# Altium footprint library Single_ETU_b_rev1.PcbLib: 25 footprints (part 2 of 4)
Each footprint in its own frame and in the unit in brackets; x right, y up, seen from the top. Pads: shape width x height; smd on the part's side, far side on the other; paste and mask are expansions set on the pad; w line width, h text height; cw(c..) or ccw(c..) is an arc to the next point about the centre after c.
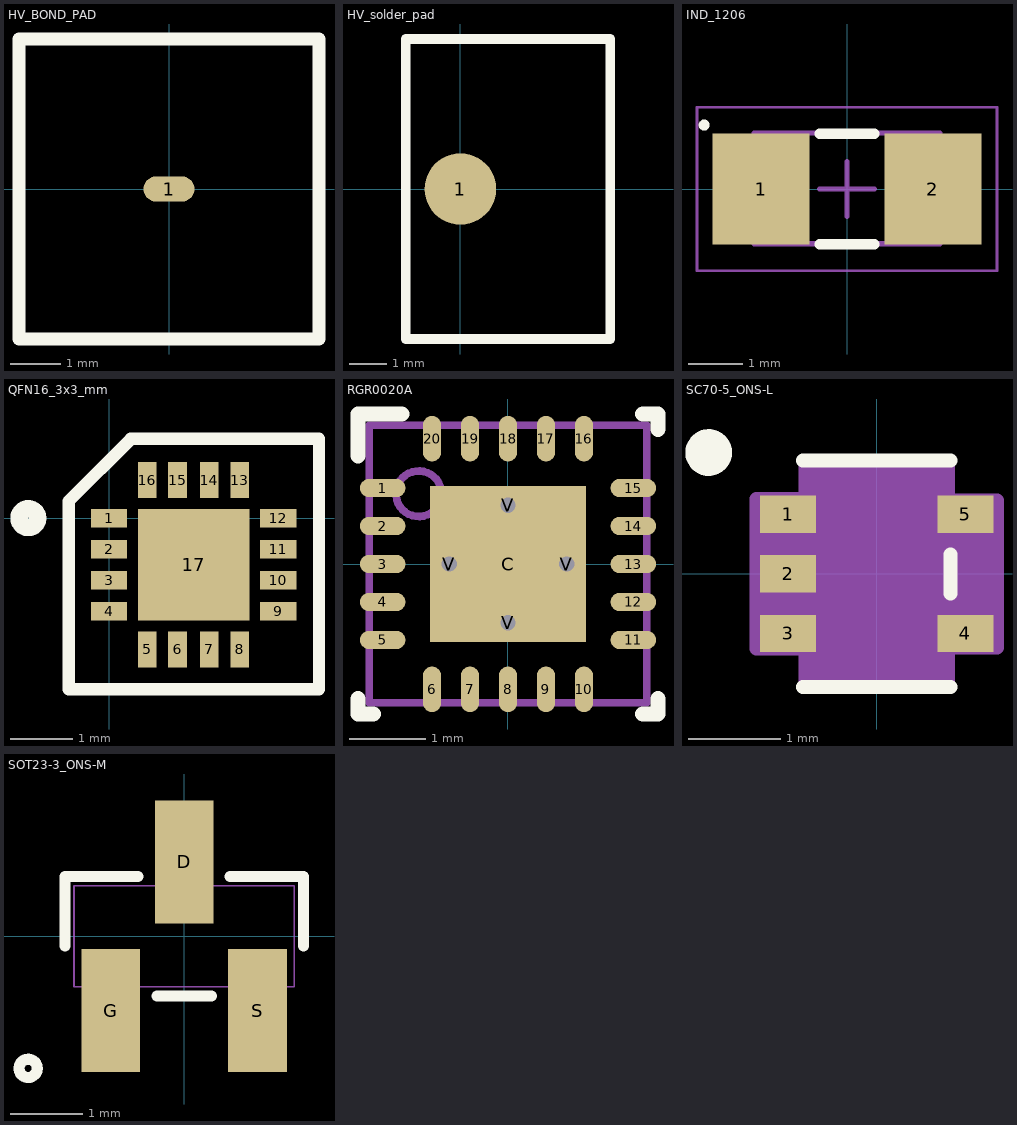
[diagram p1: the footprints below, top view; thin cyan lines are the x and y axes]

## HV_BOND_PAD [mil] "Bonding site for high voltage bias to Timepix"
height 1
pads (1):
  oval 40x20 smd paste-30 mask+10: 1(0,0)
Top Overlay:
  lines w10: -118.11,-118.11 118.11,-118.11 118.11,118.11 -118.11,118.11 -118.11,-118.11

## HV_solder_pad [mil] "wire soldering site for high voltage bias to Timepix"
height 1
pads (1):
  round 75 smd: 1(0,0)
Top Overlay:
  lines w10: -57.52,-157.48 157.48,-157.48 157.48,157.48 -57.52,157.48 -57.52,-157.48

## IND_1206 [mil] "Chip Inductor, 2-Leads, Body 3.20x1.60mm, IPC Low Density"
height 109.84
pads (2):
  rect 70x80 smd: 1(-62,0) 2(62,0)
Top Overlay:
  circle w3.94: c-103.13,46.15 r1.97
  lines w7.87: -19.68,-39.86 19.69,-39.86 ; -19.68,39.86 19.69,39.86
Mechanical 13:
  lines w3.94: -66.93,-39.43 66.93,-39.43 ; -66.93,-35.43 -66.93,35.43 ; -66.93,40.43 66.93,40.43 ; 66.93,-35.43 66.93,35.43
Mechanical 15:
  lines w1.97: -108.27,-59.06 -108.27,59.06 108.27,59.06 108.27,-59.06 -108.27,-59.06
  lines w3.94: -19.68,0 19.69,0 ; 0,-19.69 0,19.69
3D body: height 109.84, standoff 0, extent -46.85,-35.43 46.85,35.43
3D body: height 109.84, standoff 0, extent -66.93,-35.43 -46.85,35.43
3D body: height 109.84, standoff 0, extent 46.85,-35.43 66.93,35.43

## QFN16_3x3_mm [mm]
height 0.254
pads (17):
  rect 0.58x0.3 smd: 1(0,0) 2(0,-0.5) 3(0,-1) 4(0,-1.5) 9(2.72,-1.5) 10(2.72,-1) 11(2.72,-0.5) 12(2.72,0)
  rect 0.3x0.58 smd: 5(0.61,-2.11) 6(1.1,-2.11) 7(1.61,-2.11) 8(2.1,-2.11) 13(2.1,0.61) 14(1.61,0.61) 15(1.1,0.61) 16(0.61,0.61)
  rect 1.789x1.789 smd paste-0.076: 17(1.36,-0.75)
Top Overlay:
  circle w0.28: c-1.3,0 r0.15
  lines w0.2: -0.65,-2.75 -0.65,0.275 0.35,1.275 3.375,1.275 3.375,-2.75 -0.65,-2.75

## RGR0020A [mm]
height 2.79
pads (25):
  oval 0.6x0.24 smd paste+0 mask+0.051: 1(-1.65,1) 2(-1.65,0.5) 3(-1.65,0) 4(-1.65,-0.5) 5(-1.65,-1) 11(1.65,-1) 12(1.65,-0.5) 13(1.65,0) 14(1.65,0.5) 15(1.65,1)
  oval 0.24x0.6 smd paste+0 mask+0: 6(-1,-1.65)
  oval 0.24x0.6 smd paste+0 mask+0.051: 7(-0.5,-1.65) 8(0,-1.65) 9(0.5,-1.65) 10(1,-1.65) 16(1,1.65) 17(0.5,1.65) 18(0,1.65) 19(-0.5,1.65) 20(-1,1.65)
  rect 2.05x2.05 smd paste-0.051 mask+0.051: C(0,0)
  round 0.5 hole 0.203 mask+0.051: V(-0.775,0) V(0,-0.775) V(0,0.775) V(0.775,0)
Top Overlay:
  lines w0.2: -1.975,-1.775 -1.975,-1.975 -1.775,-1.975 ; -1.975,1.425 -1.975,1.975 -1.4,1.975 ; 1.775,-1.975 1.975,-1.975 1.975,-1.775 ; 1.775,1.975 1.975,1.975 1.975,1.775
Top Paste:
  region: 0.1,1.017 0.1,0.1 1.017,0.1 1.017,1.017
  region: -0.1,0.1 -0.1,1.017 -1.017,1.017 -1.017,0.1
  region: -0.1,-1.017 -0.1,-0.1 -1.017,-0.1 -1.017,-1.017
  region: 0.1,-0.1 0.1,-1.017 1.017,-1.017 1.017,-0.1
Mechanical 13:
  circle w0.1: c-1.175,0.925 r0.3
  lines w0.1: -1.825,-1.825 -1.825,1.825 1.825,1.825 1.825,-1.825 -1.825,-1.825
  text ".Designator" at -1.524,-1.397 h1.27
3D body: height 0.25, standoff 0, extent 0,0 0.254,0.254

## SC70-5_ONS-L [mil]
height 109.84
pads (5):
  rect 24x16 smd paste+2 mask+2: 1(-38,25.5) 2(-38,0) 3(-38,-25.5) 4(38,-25.5) 5(38,25.5)
Top Overlay:
  circle w10: c-72,52 r5
  lines w6: -31.5,-48.5 31.5,-48.5 ; -31.5,48.5 31.5,48.5 ; 31.5,-8.4 31.5,8.4
Mechanical 13:
  lines w0: -12,43.5 ccw(c0,43.5) 12,43.5
  lines w1: -43.5,-31 -26.5,-31 -26.5,-21 -43.5,-21 -43.5,-31 ; -43.5,-5 -26.5,-5 -26.5,5 -43.5,5 -43.5,-5 ; -43.5,21 -26.5,21 -26.5,31 -43.5,31 -43.5,21 ; -26.5,-43.5 -26.5,43.5 26.5,43.5 26.5,-43.5 -26.5,-43.5 ; 26.5,-30.5 43.5,-30.5 43.5,-20.5 26.5,-20.5 26.5,-30.5 ; 26.5,20.5 43.5,20.5 43.5,30.5 26.5,30.5 26.5,20.5
Mechanical 15:
  region: 30.5,-47.5 -30.5,-47.5 -30.5,-32 -51.5,-32 -51.5,32 -30.5,32 -30.5,47.5 30.5,47.5 30.5,31.5 51.5,31.5 51.5,-31.5 30.5,-31.5
  lines w6: -51.5,-32 -51.5,32 -30.5,32 -30.5,47.5 30.5,47.5 30.5,31.5 51.5,31.5 51.5,-31.5 30.5,-31.5 30.5,-47.5 -30.5,-47.5 -30.5,-32 -51.5,-32
3D body: height 10, standoff 0, extent 0,0 10,10

## SOT23-3_ONS-M [mil]
height 109.84
pads (3):
  rect 32x67 smd paste+0 mask+0: D(0,40.5) G(-40,-40.5) S(40,-40.5)
Top Overlay:
  circle w6: c-85,-72 r5
  lines w6: -65,-5.38 -65,32.5 -25.1,32.5 ; -14.9,-32.5 14.9,-32.5 ; 25.1,32.5 65,32.5 65,-5.38
Mechanical 13:
  circle w0: c-50,-17.5 r5
  lines w1: -60,-27.5 -60,27.5 60,27.5 60,-27.5 -60,-27.5 ; -50,-52 -30,-52 -30,-27.5 -50,-27.5 -50,-52 ; -10,27.5 -10,52 10,52 10,27.5 -10,27.5 ; 30,-52 50,-52 50,-27.5 30,-27.5 30,-52
3D body: height 10, standoff 0, extent 0,0 10,10